# Altium footprint library SOT95P275X135-6.PcbLib: 1 footprints
Each footprint in its own frame and in the unit in brackets; x right, y up, seen from the top. Pads: shape width x height; smd on the part's side, far side on the other; paste and mask are expansions set on the pad; w line width, h text height; cw(c..) or ccw(c..) is an arc to the next point about the centre after c.
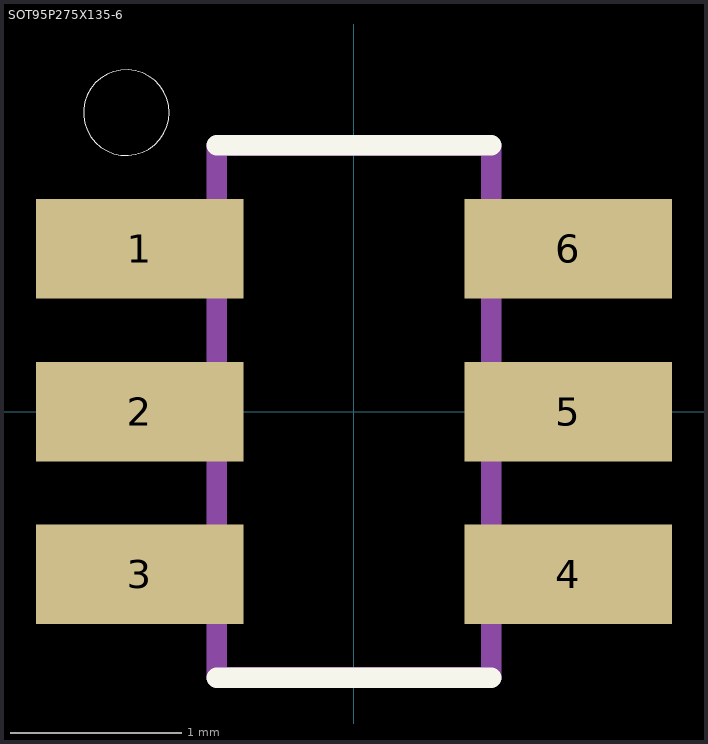
[diagram p0: the footprint, top view; thin cyan lines are the x and y axes]

## SOT95P275X135-6 [mm]
pads (6):
  rect 1.212x0.58 smd: 1(-1.25,0.95) 2(-1.25,0) 3(-1.25,-0.95) 4(1.25,-0.95) 5(1.25,0) 6(1.25,0.95)
Top Overlay:
  circle w0: c-1.328,1.744 r0.25
  lines w0.12: -0.8,-1.554 0.8,-1.554 ; -0.8,1.554 0.8,1.554
Mechanical 13:
  lines w0.12: -0.8,-1.55 -0.8,1.55 0.8,1.55 0.8,-1.55 -0.8,-1.55
3D body "Package_TO_SOT_SMD_SOT-23-6.step": height 1.55, standoff 0, extent -1.4,-1.45 1.4,1.45